# Altium schematic symbol library PTS636SK25JSMTRLFS.SchLib: 1 symbol
Pins are listed as number, name and electrical type; pins without a type are passive.

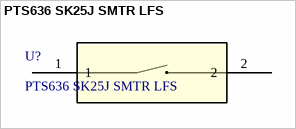
[diagram p0: symbol PTS636 SK25J SMTR LFS]

## PTS636 SK25J SMTR LFS
designator U?
Description; Manufacturer_Name: C&K Components; Copyright: Copyright (C) 2026 Ultra Librarian. All rights reserved.; Manufacturer_Part_Number: PTS636 SK25J SMTR LFS; RefDes: RefDes; Type: Type
footprint SW_PTS636_SK25J_SMTR_LFS_CNK
pins: 1, 2